# Altium footprint library Inductor.PcbLib: 58 footprints (part 2 of 4)
Each footprint in its own frame and in the unit in brackets; x right, y up, seen from the top. Pads: shape width x height; smd on the part's side, far side on the other; paste and mask are expansions set on the pad; w line width, h text height; cw(c..) or ccw(c..) is an arc to the next point about the centre after c.
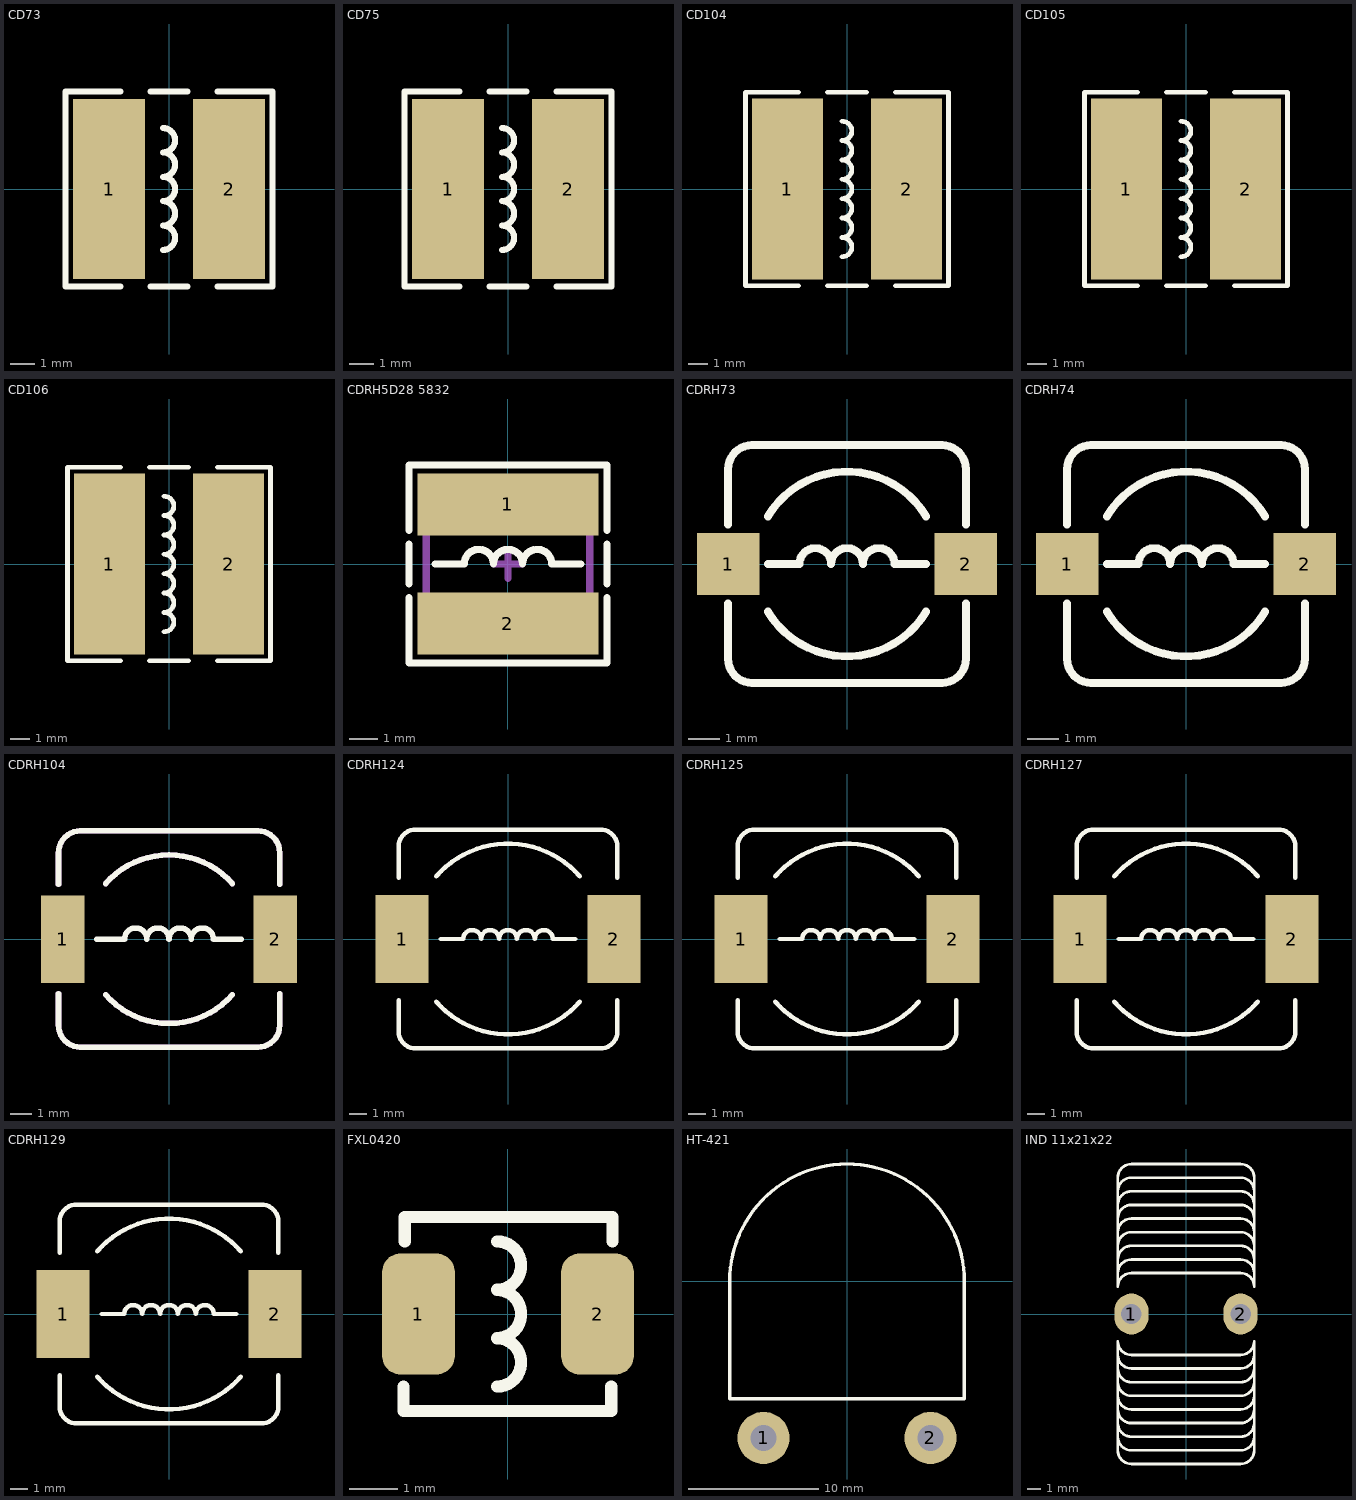
[diagram p1: the footprints below, top view; thin cyan lines are the x and y axes]

## CD73 [mm] "7.8*7*3.5mm"
pads (2):
  rect 3x7.5 smd: 1(-2.5,0) 2(2.5,0)
Top Overlay:
  lines w0.254: -2.032,-4.064 -4.318,-4.064 -4.318,4.064 -2.032,4.064 ; -0.762,-4.064 0.762,-4.064 ; -0.762,4.064 0.762,4.064 ; -0.254,-2.54 ccw(c-0.254,-2.032) -0.254,-1.524 ccw(c-0.254,-1.016) -0.254,-0.508 ccw(c-0.254,0) -0.254,0.508 ccw(c-0.254,1.016) -0.254,1.524 ccw(c-0.254,2.032) -0.254,2.54 ; 2.032,-4.064 4.318,-4.064 4.318,4.064 2.032,4.064
Top Designator:
  text ".Designator" at -3.71,-0.344 h1.52
3D body "CD73.STEP": height 3.75, standoff 0, extent -3.849,-3.5 3.849,3.5

## CD75 [mm] "7.8*7*5mm"
pads (2):
  rect 3x7.5 smd: 1(-2.5,0) 2(2.5,0)
Top Overlay:
  lines w0.254: -2.032,-4.064 -4.318,-4.064 -4.318,4.064 -2.032,4.064 ; -0.762,-4.064 0.762,-4.064 ; -0.762,4.064 0.762,4.064 ; -0.254,-2.54 ccw(c-0.254,-2.032) -0.254,-1.524 ccw(c-0.254,-1.016) -0.254,-0.508 ccw(c-0.254,0) -0.254,0.508 ccw(c-0.254,1.016) -0.254,1.524 ccw(c-0.254,2.032) -0.254,2.54 ; 2.032,-4.064 4.318,-4.064 4.318,4.064 2.032,4.064
Top Designator:
  text ".Designator" at -3.71,-0.344 h1.52
3D body "CD75.STEP": height 5.15, standoff 0, extent -3.849,-3.5 3.849,3.5

## CD104 [mm] "10*9*4mm"
pads (2):
  rect 3.75x9.5 smd: 1(-3.125,0) 2(3.125,0)
Top Overlay:
  lines w0.254: -2.54,-5.08 -5.334,-5.08 -5.334,5.08 -2.54,5.08 ; -1.016,-5.08 1.016,-5.08 ; -1.016,5.08 1.016,5.08 ; -0.254,-3.556 ccw(c-0.254,-3.048) -0.254,-2.54 ccw(c-0.254,-2.032) -0.254,-1.524 ccw(c-0.254,-1.016) -0.254,-0.508 ccw(c-0.254,0) -0.254,0.508 ccw(c-0.254,1.016) -0.254,1.524 ccw(c-0.254,2.032) -0.254,2.54 ccw(c-0.254,3.048) -0.254,3.556 ; 2.54,-5.08 5.334,-5.08 5.334,5.08 2.54,5.08
Top Designator:
  text ".Designator" at -3.71,-0.344 h1.52
3D body "CD104.STEP": height 4.7, standoff 0, extent -4.954,-4.5 4.954,4.5

## CD105 [mm] "10*9*5.4mm"
pads (2):
  rect 3.75x9.5 smd: 1(-3.125,0) 2(3.125,0)
Top Overlay:
  lines w0.254: -2.54,-5.08 -5.334,-5.08 -5.334,5.08 -2.54,5.08 ; -1.016,-5.08 1.016,-5.08 ; -1.016,5.08 1.016,5.08 ; -0.254,-3.556 ccw(c-0.254,-3.048) -0.254,-2.54 ccw(c-0.254,-2.032) -0.254,-1.524 ccw(c-0.254,-1.016) -0.254,-0.508 ccw(c-0.254,0) -0.254,0.508 ccw(c-0.254,1.016) -0.254,1.524 ccw(c-0.254,2.032) -0.254,2.54 ccw(c-0.254,3.048) -0.254,3.556 ; 2.54,-5.08 5.334,-5.08 5.334,5.08 2.54,5.08
Top Designator:
  text ".Designator" at -3.71,-0.344 h1.52
3D body "CD105.STEP": height 5.5, standoff 0, extent -4.954,-4.5 4.954,4.5

## CD106 [mm] "10*9*6.5mm"
pads (2):
  rect 3.75x9.5 smd: 1(-3.125,0) 2(3.125,0)
Top Overlay:
  lines w0.254: -2.54,-5.08 -5.334,-5.08 -5.334,5.08 -2.54,5.08 ; -1.016,-5.08 1.016,-5.08 ; -1.016,5.08 1.016,5.08 ; -0.254,-3.556 ccw(c-0.254,-3.048) -0.254,-2.54 ccw(c-0.254,-2.032) -0.254,-1.524 ccw(c-0.254,-1.016) -0.254,-0.508 ccw(c-0.254,0) -0.254,0.508 ccw(c-0.254,1.016) -0.254,1.524 ccw(c-0.254,2.032) -0.254,2.54 ccw(c-0.254,3.048) -0.254,3.556 ; 2.54,-5.08 5.334,-5.08 5.334,5.08 2.54,5.08
Top Designator:
  text ".Designator" at -3.71,-0.344 h1.52
3D body "CD106.STEP": height 6.3, standoff 0, extent -4.954,-4.5 4.954,4.5

## CDRH5D28 5832 [mm] "5.7*5.7*3.2mm"
pads (2):
  rect 6.3x2.15 smd: 1(0,2.075) 2(0,-2.075)
Top Overlay:
  lines w0.254: -3.45,-1.164 -3.45,-3.45 3.45,-3.45 3.45,-1.164 ; -3.45,-0.7 -3.45,0.7 ; -3.45,1.164 -3.45,3.45 3.45,3.45 3.45,1.164 ; -2.54,0 -1.524,0 cw(c-1.016,0) -0.508,0 cw(c0,0) 0.508,0 cw(c1.016,0) 1.524,0 2.54,0 ; 3.45,-0.7 3.45,0.7
Top Designator:
  text ".Designator" at -3.71,-0.344 h1.52
Top Component Outline:
  lines w0.254: -2.85,-2.85 -2.85,2.85 2.85,2.85 2.85,-2.85 -2.85,-2.85
Top Component Center (Mech8):
  lines w0.254: -0.5,0 0.5,0 ; 0,-0.5 0,0.5
3D body "CDRH5D28.stp": height 3, standoff 0, extent -3,-3 3,3

## CDRH73 [mm] "7.3*7.3*3.4mm"
pads (2):
  rect 2x2 smd: 1(-3.81,0) 2(3.81,0)
Top Overlay:
  lines w0.254: -3.81,-1.27 -3.81,-3.048 ccw(c-3.048,-3.048) -3.048,-3.81 3.048,-3.81 ccw(c3.048,-3.048) 3.81,-3.048 3.81,-1.27 ; -3.81,1.27 -3.81,3.048 cw(c-3.048,3.048) -3.048,3.81 3.048,3.81 cw(c3.048,3.048) 3.81,3.048 3.81,1.27 ; -2.54,-1.524 ccw(c0,0) 2.54,-1.524 ; -2.54,0 -1.524,0 cw(c-1.016,0) -0.508,0 cw(c0,0) 0.508,0 cw(c1.016,0) 1.524,0 2.54,0 ; -2.54,1.524 cw(c0,0) 2.54,1.524
Top Designator:
  text ".Designator" at -3.71,-0.344 h1.52
3D body "CDRH73.STEP": height 3.65, standoff 0, extent -3.65,-3.65 3.65,3.65

## CDRH74 [mm] "7.3*7.3*4.5mm"
pads (2):
  rect 2x2 smd: 1(-3.81,0) 2(3.81,0)
Top Overlay:
  lines w0.254: -3.81,-1.27 -3.81,-3.048 ccw(c-3.048,-3.048) -3.048,-3.81 3.048,-3.81 ccw(c3.048,-3.048) 3.81,-3.048 3.81,-1.27 ; -3.81,1.27 -3.81,3.048 cw(c-3.048,3.048) -3.048,3.81 3.048,3.81 cw(c3.048,3.048) 3.81,3.048 3.81,1.27 ; -2.54,-1.524 ccw(c0,0) 2.54,-1.524 ; -2.54,0 -1.524,0 cw(c-1.016,0) -0.508,0 cw(c0,0) 0.508,0 cw(c1.016,0) 1.524,0 2.54,0 ; -2.54,1.524 cw(c0,0) 2.54,1.524
Top Designator:
  text ".Designator" at -3.71,-0.344 h1.52
3D body "CDRH74.STEP": height 4.5, standoff 0, extent -3.65,-3.65 3.65,3.65

## CDRH104 [mm] "10*10*3.8mm"
height 3.8
pads (2):
  rect 2x4 smd: 1(-4.85,0) 2(4.85,0)
Top Overlay:
  lines w0.254: -5.045,-2.5 -5.045,-3.934 ccw(c-4.045,-3.934) -4.045,-4.934 4.057,-4.934 ccw(c4.057,-3.934) 5.057,-3.934 5.057,-2.5 ; -5.045,2.5 -5.045,3.946 cw(c-4.045,3.946) -4.045,4.946 4.057,4.946 cw(c4.057,3.946) 5.057,3.946 5.057,2.5 ; -3.302,0 -2.032,0 cw(c-1.524,0) -1.016,0 cw(c-0.508,0) 0,0 cw(c0.508,0) 1.016,0 cw(c1.524,0) 2.032,0 3.302,0 ; -2.897,-2.535 ccw(c0,0) 2.897,-2.535 ; -2.897,2.535 cw(c0,0) 2.897,2.535
Top Designator:
  text ".Designator" at -3.71,-0.338 h1.52
Bottom Component Center:
  lines w0.254: -5.045,-2.5 -5.045,-3.934 ccw(c-4.045,-3.934) -4.045,-4.934 4.057,-4.934 ccw(c4.057,-3.934) 5.057,-3.934 5.057,-2.5 ; -5.045,2.5 -5.045,3.946 cw(c-4.045,3.946) -4.045,4.946 4.057,4.946 cw(c4.057,3.946) 5.057,3.946 5.057,2.5 ; -2.897,-2.535 ccw(c0,0) 2.897,-2.535 ; -2.897,2.535 cw(c0,0) 2.897,2.535
3D body "CDRH104R.STEP": height 3.85, standoff 0.05, extent -5.05,-4.95 5.05,4.95

## CDRH124 [mm] "12*12*4.5mm"
pads (2):
  rect 3x5 smd: 1(-6,0) 2(6,0)
Top Overlay:
  lines w0.254: -6.2,-3.475 -6.2,-5.23 ccw(c-5.23,-5.23) -5.23,-6.2 5.23,-6.2 ccw(c5.23,-5.23) 6.2,-5.23 6.2,-3.475 ; -6.2,3.475 -6.2,5.23 cw(c-5.23,5.23) -5.23,6.2 5.23,6.2 cw(c5.23,5.23) 6.2,5.23 6.2,3.475 ; -4.064,-3.556 ccw(c0,0) 4.064,-3.556 ; -4.064,3.556 cw(c0,0) 4.064,3.556 ; -3.81,0 -2.54,0 cw(c-2.032,0) -1.524,0 cw(c-1.016,0) -0.508,0 cw(c0,0) 0.508,0 cw(c1.016,0) 1.524,0 cw(c2.032,0) 2.54,0 3.81,0
Top Designator:
  text ".Designator" at -3.71,-0.344 h1.52
3D body "CDRH124.STEP": height 4.55, standoff 0.05, extent -6,-6 6,6

## CDRH125 [mm] "12*12*5mm"
pads (2):
  rect 3x5 smd: 1(-6,0) 2(6,0)
Top Overlay:
  lines w0.254: -6.2,-3.475 -6.2,-5.23 ccw(c-5.23,-5.23) -5.23,-6.2 5.23,-6.2 ccw(c5.23,-5.23) 6.2,-5.23 6.2,-3.475 ; -6.2,3.475 -6.2,5.23 cw(c-5.23,5.23) -5.23,6.2 5.23,6.2 cw(c5.23,5.23) 6.2,5.23 6.2,3.475 ; -4.064,-3.556 ccw(c0,0) 4.064,-3.556 ; -4.064,3.556 cw(c0,0) 4.064,3.556 ; -3.81,0 -2.54,0 cw(c-2.032,0) -1.524,0 cw(c-1.016,0) -0.508,0 cw(c0,0) 0.508,0 cw(c1.016,0) 1.524,0 cw(c2.032,0) 2.54,0 3.81,0
Top Designator:
  text ".Designator" at -3.71,-0.344 h1.52
3D body "CDRH125.STEP": height 5.05, standoff 0.05, extent -6,-6 6,6

## CDRH127 [mm] "12*12*8mm"
pads (2):
  rect 3x5 smd: 1(-6,0) 2(6,0)
Top Overlay:
  lines w0.254: -6.2,-3.475 -6.2,-5.23 ccw(c-5.23,-5.23) -5.23,-6.2 5.23,-6.2 ccw(c5.23,-5.23) 6.2,-5.23 6.2,-3.475 ; -6.2,3.475 -6.2,5.23 cw(c-5.23,5.23) -5.23,6.2 5.23,6.2 cw(c5.23,5.23) 6.2,5.23 6.2,3.475 ; -4.064,-3.556 ccw(c0,0) 4.064,-3.556 ; -4.064,3.556 cw(c0,0) 4.064,3.556 ; -3.81,0 -2.54,0 cw(c-2.032,0) -1.524,0 cw(c-1.016,0) -0.508,0 cw(c0,0) 0.508,0 cw(c1.016,0) 1.524,0 cw(c2.032,0) 2.54,0 3.81,0
Top Designator:
  text ".Designator" at -3.71,-0.344 h1.52
3D body "CDRH127.STEP": height 7.8, standoff 0, extent -6,-6 6,6

## CDRH129 [mm] "12*12*9.5mm"
pads (2):
  rect 3x5 smd: 1(-6,0) 2(6,0)
Top Overlay:
  lines w0.254: -6.2,-3.475 -6.2,-5.23 ccw(c-5.23,-5.23) -5.23,-6.2 5.23,-6.2 ccw(c5.23,-5.23) 6.2,-5.23 6.2,-3.475 ; -6.2,3.475 -6.2,5.23 cw(c-5.23,5.23) -5.23,6.2 5.23,6.2 cw(c5.23,5.23) 6.2,5.23 6.2,3.475 ; -4.064,-3.556 ccw(c0,0) 4.064,-3.556 ; -4.064,3.556 cw(c0,0) 4.064,3.556 ; -3.81,0 -2.54,0 cw(c-2.032,0) -1.524,0 cw(c-1.016,0) -0.508,0 cw(c0,0) 0.508,0 cw(c1.016,0) 1.524,0 cw(c2.032,0) 2.54,0 3.81,0
Top Designator:
  text ".Designator" at -3.71,-0.344 h1.52
3D body "CDRH129.STEP": height 9.65, standoff 0.05, extent -6,-6 6,6

## FXL0420 [mm] "42x44x18mm"
pads (2):
  rrect50% 1.5x2.5 smd mask+0.102: 1(-1.85,0) 2(1.85,0)
Top Overlay:
  lines w0.254: -2.159,-1.499 -2.159,-2.007 2.134,-2.007 2.134,-1.499 ; -2.134,1.499 -2.134,2.007 2.159,2.007 2.159,1.499 ; -0.229,-1.5 ccw(c-0.229,-1) -0.229,-0.5 ccw(c-0.229,0) -0.229,0.5 ccw(c-0.229,1) -0.229,1.5
Top Designator:
  text ".Designator" at -3.71,-0.344 h1.52
3D body "Inductor_SMD_AMPLF_0420.STEP": height 2.06, standoff 0.05, extent -2.15,-2 2.15,2

## HT-421 [mm] "20*18*18mm"
pads (2):
  round 4 hole 2: 1(-6.4,-12) 2(6.4,-12)
Top Overlay:
  lines w0.254: -9,-9 9,-9 9,0 ccw(c0,0) -9,0 -9,-9
Top Designator:
  text ".Designator" at -3.71,-2.831 h1.52
3D body: height 20, standoff 0, extent -9,-9 9,9

## IND 11x21x22 [mm]
pads (2):
  oval 2.5x3 hole 1.5: 1(-4,0) 2(4,0)
Top Overlay:
  lines w0.2: -5,-9 ccw(c-4,-9) -4,-10 4,-10 ccw(c4,-9) 5,-9 ; -5,-8 ccw(c-4,-8) -4,-9 4,-9 ccw(c4,-8) 5,-8 ; -5,-7 ccw(c-4,-7) -4,-8 4,-8 ccw(c4,-7) 5,-7 ; -5,-6 ccw(c-4,-6) -4,-7 4,-7 ccw(c4,-6) 5,-6 ; -5,-5 ccw(c-4,-5) -4,-6 4,-6 ccw(c4,-5) 5,-5 ; -5,-4 ccw(c-4,-4) -4,-5 4,-5 ccw(c4,-4) 5,-4 ; -5,-3 ccw(c-4,-3) -4,-4 4,-4 ccw(c4,-3) 5,-3 ; -5,3 cw(c-4,3) -4,4 4,4 cw(c4,3) 5,3 ; -5,4 cw(c-4,4) -4,5 4,5 cw(c4,4) 5,4 ; -5,5 cw(c-4,5) -4,6 4,6 cw(c4,5) 5,5 ; -5,6 cw(c-4,6) -4,7 4,7 cw(c4,6) 5,6 ; -5,7 cw(c-4,7) -4,8 4,8 cw(c4,7) 5,7 ; -5,8 cw(c-4,8) -4,9 4,9 cw(c4,8) 5,8 ; -5,9 cw(c-4,9) -4,10 4,10 cw(c4,9) 5,9 ; -5,-10 ccw(c-4,-10) -4,-11 4,-11 ccw(c4,-10) 5,-10 5,-2 cw(c4,-2) 4,-3 -4,-3 cw(c-4,-2) -5,-2 -5,-10 ; -5,2 cw(c-4,2) -4,3 4,3 cw(c4,2) 5,2 5,10 ccw(c4,10) 4,11 -4,11 ccw(c-4,10) -5,10 -5,2
3D body "User Library-5701-RC.STEP": height 23.03, standoff -12, extent -5.66,-11.21 5.66,11.21